# Altium schematic symbol library ACT45B-510-2P-TL003.SchLib: 1 symbol
Pins are listed as number, name and electrical type; pins without a type are passive.

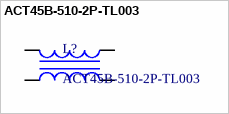
[diagram p0: symbol ACT45B-510-2P-TL003]

## ACT45B-510-2P-TL003
designator L?
Common-Mode Choke for CAN Bus System, 51uH, 50 V DC, -40 to 150 degC, 4-Pin SMD, RoHS, Tape and Reel
footprint TDK-ACT45B-510-2P-TL003-4_V (SMD, 4-Leads, Body 4.7x3.4mm, Pitch 2.5mm)
pins: 1, 2, 3, 4